# Altium schematic symbol library capacitor-polar.SchLib: 1 symbol
Pins are listed as number, name and electrical type; pins without a type are passive.

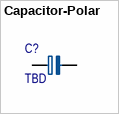
[diagram p0: symbol Capacitor-Polar]

## Capacitor-Polar
designator C?, comment TBD
Polarized capacitor; Value: TBD; Voltage Rating: TBD; Tolerance: TBD; Manufacturer: *; Manufacturer Part Number: *
footprint cap-ae-d10-h12.4-av (Aluminium electrolytic/polymer V-chip, D10 x H12.4, anti-vibration (KEMET MS-AV), body 10.80x10.30x12.90 mm max, pads per KEMET A786 datasheet)
pins: 1, 2